# Altium schematic symbol library MT29F4G01ABAFDWB-IT_F.SchLib: 1 symbol
Pins are listed as number, name and electrical type; pins without a type are passive.

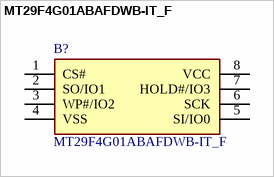
[diagram p0: symbol MT29F4G01ABAFDWB-IT_F]

## MT29F4G01ABAFDWB-IT_F
designator B?
NAND Flash SLC 4G 4GX1 UPDFN IT M70A; Manufacturer_Name: Micron; Manufacturer_Part_Number: MT29F4G01ABAFDWB-IT:F; Geometry.Height: 0.65mm; Mouser Part Number: 340-359563; Mouser Price/Stock: https://www.mouser.co.uk/ProductDetail/Micron/MT29F4G01ABAFDWB-ITF?qs=wUXugUrL1qwrjb7To7JPbA%3D%3D; Arrow Part Number: MT29F4G01ABAFDWB-IT:F; Arrow Price/Stock: null?region=nac; Datasheet Link: https://www.farnell.com/datasheets/3151403.pdf
footprint SON127P800X600X65-8N
pins: 1 CS#, 2 SO/IO1, 3 WP#/IO2, 4 VSS, 5 SI/IO0, 6 SCK, 7 HOLD#/IO3, 8 VCC